# Altium footprint library EVISUN_A0512S-2W.PcbLib: 1 footprints
Each footprint in its own frame and in the unit in brackets; x right, y up, seen from the top. Pads: shape width x height; smd on the part's side, far side on the other; paste and mask are expansions set on the pad; w line width, h text height; cw(c..) or ccw(c..) is an arc to the next point about the centre after c.
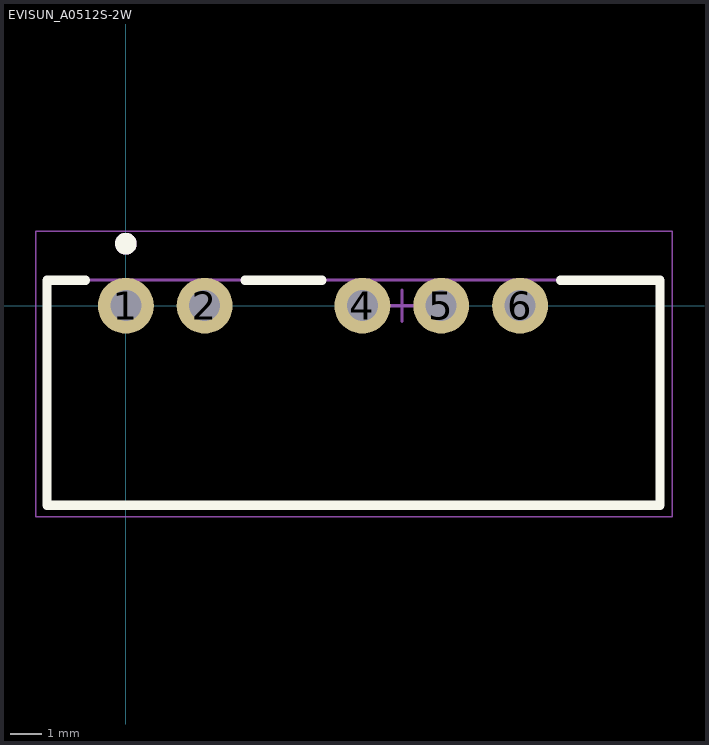
[diagram p0: the footprint, top view; thin cyan lines are the x and y axes]

## EVISUN_A0512S-2W [mm]
height 10.25
pads (5):
  round 1.8 hole 1 mask+0.05: 1(0,0) 2(2.54,0) 4(7.62,0) 5(10.16,0) 6(12.7,0)
Top Overlay:
  circle w0.5: c0,2 r0.1
  lines w0.3: -1.3,0.825 -2.54,0.825 -2.54,-6.425 17.21,-6.425 17.21,0.825 14,0.825 ; 3.84,0.825 6.32,0.825
Mechanical 13:
  circle w0.5: c0,2 r0.1
  lines w0.1: -2.54,-6.425 17.21,-6.425 17.21,0.825 -2.54,0.825 -2.54,-6.425
Mechanical 15:
  lines w0.05: -2.9,-6.8 -2.9,2.4 17.6,2.4 17.6,-6.8 -2.9,-6.8
  lines w0.1: 8.39,0 9.39,0 ; 8.89,-0.5 8.89,0.5
3D body: height 10.25, standoff 0, extent -2.54,-6.425 17.21,0.825